# Altium integrated library USB-B-S-X-X-TH-TR.IntLib: 1 symbol
Pins are listed as number, name and electrical type; pins without a type are passive.

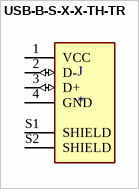
[diagram p0: symbol USB-B-S-X-X-TH-TR]

## USB-B-S-X-X-TH-TR
designator J
USB-B Series USB 2.0 Interface, Type B; MP: USB-B-S-S-B-TH-TR; MF: Samtec; Price: None; Availability: Unavailable; Package: None; SnapEDA_Link: https://www.snapeda.com/parts/USB-B-S-S-B-TH-TR/Samtec/view-part/230657/?ref=snap; Value: *
footprint SAMTEC_USB-B-S-X-X-TH-TR
pins: 1 VCC (power), 2 D- (io), 3 D+ (io), 4 GND (power), S1 SHIELD, S2 SHIELD